# Altium footprint library IC.PcbLib: 204 footprints (part 5 of 13)
Each footprint in its own frame and in the unit in brackets; x right, y up, seen from the top. Pads: shape width x height; smd on the part's side, far side on the other; paste and mask are expansions set on the pad; w line width, h text height; cw(c..) or ccw(c..) is an arc to the next point about the centre after c.
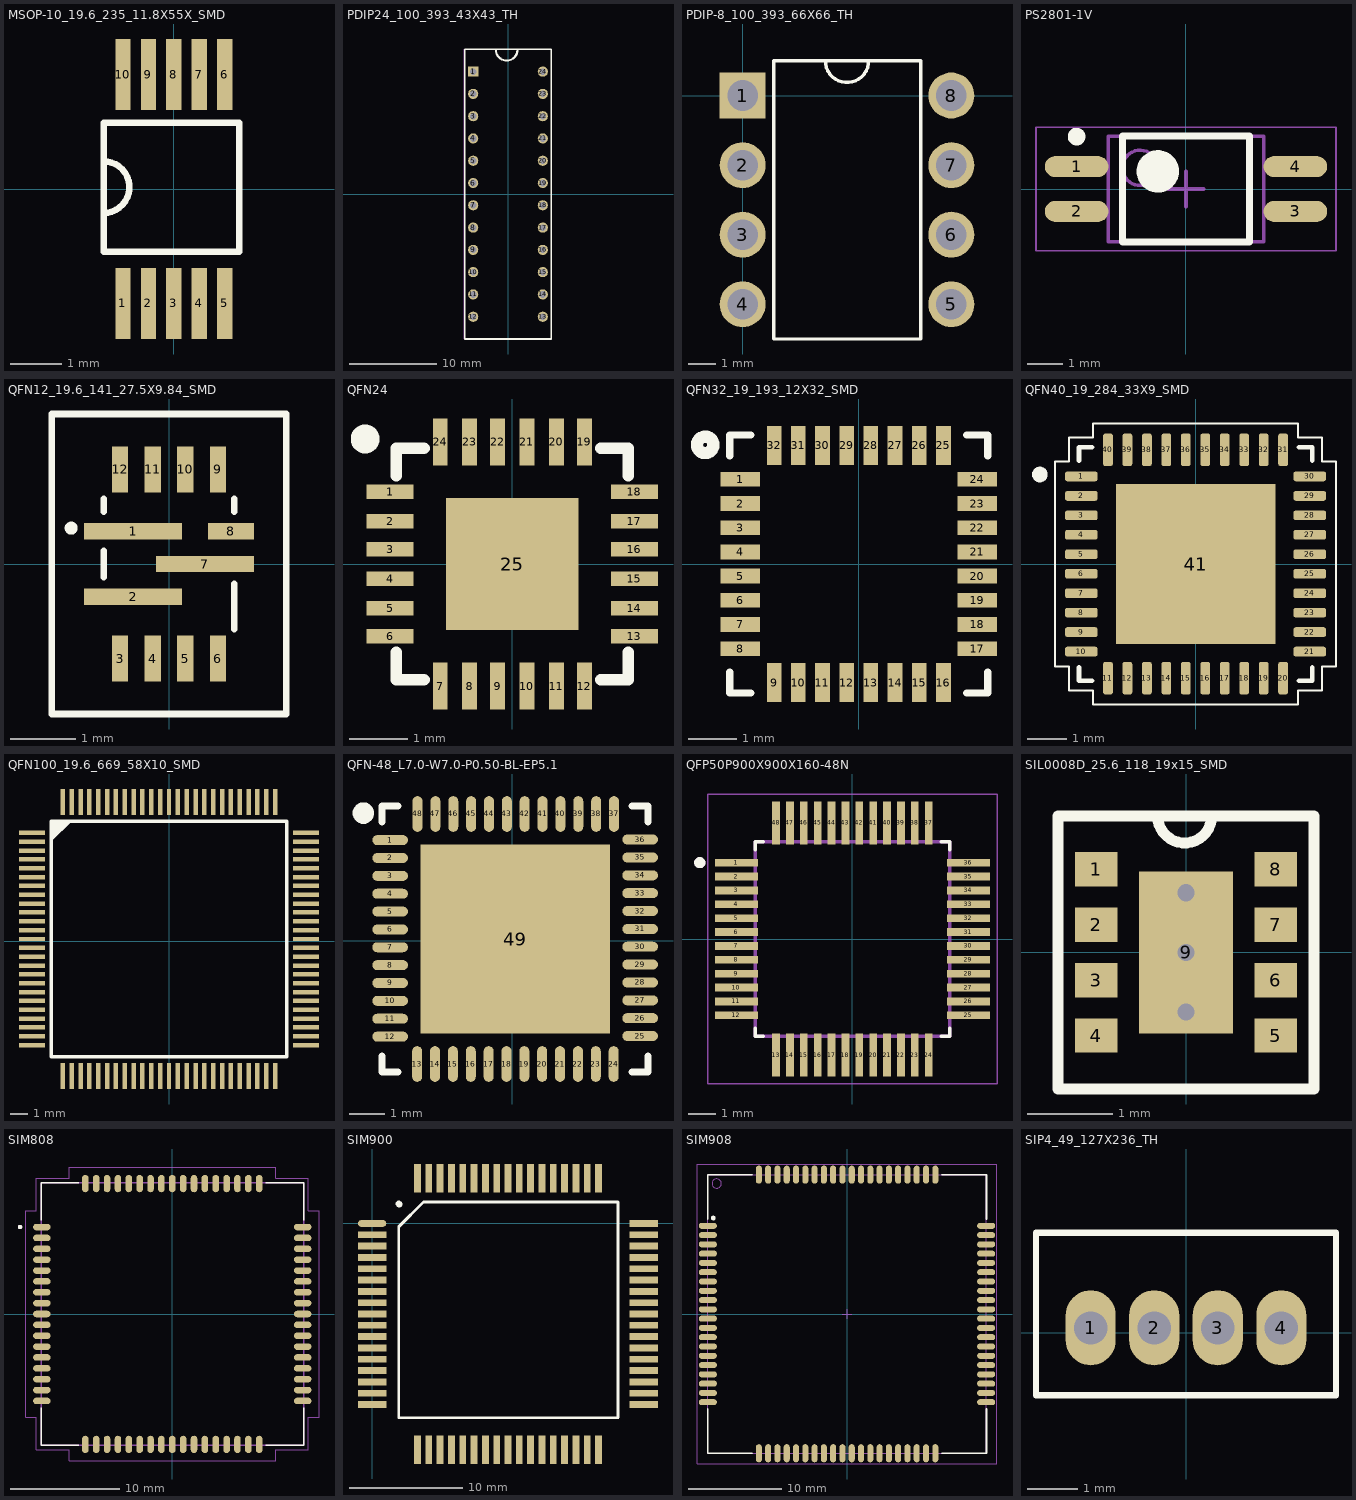
[diagram p4: the footprints below, top view; thin cyan lines are the x and y axes]

## MSOP-10_19.6_235_11.8X55X_SMD [mm] "IC"
height 0.95
pads (10):
  rect 0.3x1.4 smd mask+0.076: 1(-1,-2.25) 2(-0.5,-2.25) 3(0,-2.25) 4(0.5,-2.25) 5(1,-2.25) 6(1,2.25) 7(0.5,2.25) 8(0,2.25) 9(-0.5,2.25) 10(-1,2.25)
Top Overlay:
  lines w0.127: -1.381,-0.472 ccw(c-1.381,0.036) -1.381,0.544 ; -1.381,-1.234 -1.381,1.306 1.286,1.306 1.286,-1.234 -1.381,-1.234
3D body "User Library-MSOP-10-2.step": height 1.25, standoff 0, extent -1.5,-2.45 1.5,2.45

## PDIP24_100_393_43X43_TH [mm] "PDIP24"
height 4.95
pads (24):
  rect 1.16x1.16 / inner round 1.16 / far side rect 1.16x1.16 hole 0.76: 1(-3.97,13.97)
  round 1.16 hole 0.76: 2(-3.97,11.43) 3(-3.97,8.89) 4(-3.97,6.35) 5(-3.97,3.81) 6(-3.97,1.27) 7(-3.97,-1.27) 8(-3.97,-3.81) 9(-3.97,-6.35) 10(-3.97,-8.89) 11(-3.97,-11.43) 12(-3.97,-13.97) 13(3.97,-13.97) 14(3.97,-11.43) 15(3.97,-8.89) 16(3.97,-6.35) 17(3.97,-3.81) 18(3.97,-1.27) 19(3.97,1.27) 20(3.97,3.81) 21(3.97,6.35) 22(3.97,8.89) 23(3.97,11.43) 24(3.97,13.97)
Top Overlay:
  lines w0.178: -4.953,-16.51 -4.953,16.51 4.953,16.51 4.953,16.383 4.953,-16.51 -4.953,-16.51
  lines w0.254: -1.381,16.424 ccw(c-0.152,16.459) 1.076,16.438
Mechanical 20:
  lines w0.05: -4.96,-16.505 -4.96,16.505 4.96,16.505 4.96,-16.505 -4.96,-16.505
3D body "AD7730BNZ.stp": height 5.33, standoff -3.5, extent -4.11,-15.937 4.11,15.938

## PDIP-8_100_393_66X66_TH [mil] "DIP-8 Package"
height 200
pads (8):
  rect 66x66 hole 44: 1(0,0)
  round 66 hole 44: 2(0,-100) 3(0,-200) 4(0,-300) 5(300,-300) 6(300,-200) 7(300,-100) 8(300,0)
Top Overlay:
  lines w5: 118.78,50 ccw(c150,50) 181.22,50 ; 45,-350 255.91,-350 255.91,50 162,50 138,50 45,50 45,-350
3D body "CircuitWorks-DIP8.step": height 165, standoff -105, extent -12,-366 298,84

## PS2801-1V [mm] "SOIC127P600-8N"
height 2
pads (4):
  oval 1.8x0.6 smd: 1(-3.1,0.635) 2(-3.1,-0.635) 3(3.1,-0.635) 4(3.1,0.635)
Top Overlay:
  circle w0.25: c-3.1,1.485 r0.125
  circle w0.6: c-0.8,0.5 r0.3
  lines w0.2: -1.8,-1.5 -1.8,1.5 1.8,1.5 1.8,-1.5 -1.8,-1.5
Mechanical 13:
  circle w0.1: c-1.3,0.6 r0.5
  lines w0.1: -2.2,-1.5 -2.2,1.5 2.2,1.5 2.2,-1.5 -2.2,-1.5
Mechanical 15:
  lines w0.05: -4.25,-1.75 -4.25,1.75 4.25,1.75 4.25,-1.75 -4.25,-1.75
  lines w0.1: -0.5,0 0.5,0 ; 0,-0.5 0,0.5
3D body "PS2801-1V.step": height 2, standoff 0, extent -3.5,-1.5 3.5,1.5

## QFN12_19.6_141_27.5X9.84_SMD [mm] "QFN Package"
height 1
pads (12):
  rect 1.5x0.25 smd: 1(-0.55,0.5) 2(-0.55,-0.5) 7(0.55,0)
  rect 0.25x0.7 smd: 3(-0.75,-1.45) 4(-0.25,-1.45) 5(0.25,-1.45) 6(0.75,-1.45) 9(0.75,1.45) 10(0.25,1.45) 11(-0.25,1.45) 12(-0.75,1.45)
  rect 0.7x0.25 smd: 8(0.95,0.5)
Top Overlay:
  lines w0.1: -1,-0.2 -1,0.2 ; -1,0.8 -1,1 ; 1,-1 1,-0.3 ; 1,0.8 1,1 ; -1.8,-2.3 1.8,-2.3 ; -1.8,-2.3 -1.8,2.3 ; -1.8,-2.3 -1.8,2.3 ; -1.8,-2.3 1.8,-2.3 ; -1.8,2.3 1.8,2.3 ; -1.8,2.3 1.8,2.3 ; 1.8,-2.3 1.8,2.3 ; 1.8,-2.3 1.8,2.3 ; -1.5,0.5 cw(c-1.5,0.55) -1.5,0.6 cw(c-1.5,0.55) -1.5,0.5
3D body "User Library-qfn12p300x300ll055ls050h075.step": height 0.75, standoff 0, extent -1.5,-1.5 1.5,1.5

## QFN24 [mil]
pads (25):
  rect 32x10 smd: 1(-83,49) 2(-83,29) 3(-83,10) 4(-83,-10) 5(-83,-30) 6(-83,-49) 13(83,-49) 14(83,-30) 15(83,-10) 16(83,10) 17(83,29) 18(83,49)
  rect 10x32 smd: 7(-49,-83) 8(-29,-83) 9(-10,-83) 10(10,-83) 11(30,-83) 12(49,-83) 19(49,83) 20(30,83) 21(10,83) 22(-10,83) 23(-29,83) 24(-49,83)
  rect 90x90 smd: 25(0,0)
Top Overlay:
  lines w7.9: -78.7,-60 -78.7,-78.7 -60,-78.7 ; -78.7,60 -78.7,78.7 -60,78.7 ; 60,-78.7 78.7,-78.7 78.7,-60 ; 60,78.7 78.7,78.7 78.7,60
  lines w9.8: -95,84.9 cw(c-99.9,84.95) -95,85
3D body "QFN-24 (4x4x0.9).step": height 36.22, standoff 0, extent -78.28,-79.2 79.2,78.28

## QFN32_19_193_12X32_SMD [mil] "QFN Package"
pads (32):
  rect 32x12 smd: 1(-96.55,68.9) 2(-96.55,49.21) 3(-96.55,29.53) 4(-96.55,9.84) 5(-96.55,-9.84) 6(-96.55,-29.53) 7(-96.55,-49.21) 8(-96.55,-68.9) 17(96.55,-68.9) 18(96.55,-49.21) 19(96.55,-29.53) 20(96.55,-9.84) 21(96.55,9.84) 22(96.55,29.53) 23(96.55,49.21) 24(96.55,68.9)
  rect 12x32 smd: 9(-68.9,-96.55) 10(-49.21,-96.55) 11(-29.53,-96.55) 12(-9.84,-96.55) 13(9.84,-96.55) 14(29.53,-96.55) 15(49.21,-96.55) 16(68.9,-96.55) 25(68.9,96.55) 26(49.21,96.55) 27(29.53,96.55) 28(9.84,96.55) 29(-9.84,96.55) 30(-29.53,96.55) 31(-49.21,96.55) 32(-68.9,96.55)
Top Overlay:
  circle w10: c-125,97 r6.71
  lines w6: -105,-88 -105,-105 -88,-105 ; -105,88 -105,105 -88,105 ; 88,-105 105,-105 105,-88 ; 88,105 105,105 105,88
3D body "User Library-QFN32-1.step": height 36.92, standoff 0.31, extent -98.43,-98.44 98.43,98.44

## QFN40_19_284_33X9_SMD [mm]
pads (41):
  rrect48% 0.84x0.25 smd: 1(-2.935,2.25) 2(-2.935,1.75) 3(-2.935,1.25) 4(-2.935,0.75) 5(-2.935,0.25) 6(-2.935,-0.25) 7(-2.935,-0.75) 8(-2.935,-1.25) 9(-2.935,-1.75) 10(-2.935,-2.25) 21(2.935,-2.25) 22(2.935,-1.75) 23(2.935,-1.25) 24(2.935,-0.75) 25(2.935,-0.25) 26(2.935,0.25) 27(2.935,0.75) 28(2.935,1.25) 29(2.935,1.75) 30(2.935,2.25)
  rrect48% 0.25x0.84 smd: 11(-2.25,-2.935) 12(-1.75,-2.935) 13(-1.25,-2.935) 14(-0.75,-2.935) 15(-0.25,-2.935) 16(0.25,-2.935) 17(0.75,-2.935) 18(1.25,-2.935) 19(1.75,-2.935) 20(2.25,-2.935) 31(2.25,2.935) 32(1.75,2.935) 33(1.25,2.935) 34(0.75,2.935) 35(0.25,2.935) 36(-0.25,2.935) 37(-0.75,2.935) 38(-1.25,2.935) 39(-1.75,2.935) 40(-2.25,2.935)
  rect 4.1x4.1 smd paste-3: 41(0,0)
Top Overlay:
  circle w0.2: c-4,2.3 r0.1
  lines w0.05: -3.61,-2.63 -3.61,2.63 -3.25,2.63 -3.25,3.25 -2.63,3.25 -2.63,3.61 2.63,3.61 2.63,3.25 3.25,3.25 3.25,2.63 3.61,2.63 3.61,-2.63 3.25,-2.63 3.25,-3.25 2.63,-3.25 2.63,-3.61 -2.63,-3.61 -2.63,-3.25 -3.25,-3.25 -3.25,-2.63 -3.61,-2.63
  lines w0.127: -3,-2.66 -3,-3 -2.66,-3 ; -3,2.66 -3,3 -2.66,3 ; 2.66,-3 3,-3 3,-2.66 ; 2.66,3 3,3 3,2.66
Top Paste:
  region: 1.3,-1.303 -1.303,-1.303 -1.303,1.3 1.3,1.3
3D body "ALSRobot-QFN40 6X6.STEP": height 1.06, standoff 0.01, extent -3.075,-3 3.075,3.15

## QFN100_19.6_669_58X10_SMD [mm] "CASE: QFN"
height 1.6
pads (100):
  rect 1.475x0.254 smd mask+0.076: 1(-7.738,6.127) 2(-7.738,5.627) 3(-7.738,5.127) 4(-7.738,4.627) 5(-7.738,4.127) 6(-7.738,3.627) 7(-7.738,3.127) 8(-7.738,2.627) 9(-7.738,2.127) 10(-7.738,1.627) 11(-7.738,1.127) 12(-7.738,0.627) 13(-7.738,0.127) 14(-7.738,-0.373) 15(-7.738,-0.873) 16(-7.738,-1.373) 17(-7.738,-1.873) 18(-7.738,-2.373) 19(-7.738,-2.873) 20(-7.738,-3.373) 21(-7.738,-3.873) 22(-7.738,-4.373) 23(-7.738,-4.873) 24(-7.738,-5.373) 25(-7.738,-5.873) 51(7.738,-5.873) 52(7.738,-5.373) 53(7.738,-4.873) 54(7.738,-4.373) 55(7.738,-3.873) 56(7.738,-3.373) 57(7.738,-2.873) 58(7.738,-2.373) 59(7.738,-1.873) 60(7.738,-1.373) 61(7.738,-0.873) 62(7.738,-0.373) 63(7.738,0.127) 64(7.738,0.627) 65(7.738,1.127) 66(7.738,1.627) 67(7.738,2.127) 68(7.738,2.627) 69(7.738,3.127) 70(7.738,3.627) 71(7.738,4.127) 72(7.738,4.627) 73(7.738,5.127) 74(7.738,5.627) 75(7.738,6.127)
  rect 0.254x1.475 smd mask+0.076: 26(-6,-7.611) 27(-5.5,-7.611) 28(-5,-7.611) 29(-4.5,-7.611) 30(-4,-7.611) 31(-3.5,-7.611) 32(-3,-7.611) 33(-2.5,-7.611) 34(-2,-7.611) 35(-1.5,-7.611) 36(-1,-7.611) 37(-0.5,-7.611) 38(0,-7.611) 39(0.5,-7.611) 40(1,-7.611) 41(1.5,-7.611) 42(2,-7.611) 43(2.5,-7.611) 44(3,-7.611) 45(3.5,-7.611) 46(4,-7.611) 47(4.5,-7.611) 48(5,-7.611) 49(5.5,-7.611) 50(6,-7.611) 76(6,7.865) 77(5.5,7.865) 78(5,7.865) 79(4.5,7.865) 80(4,7.865) 81(3.5,7.865) 82(3,7.865) 83(2.5,7.865) 84(2,7.865) 85(1.5,7.865) 86(1,7.865) 87(0.5,7.865) 88(0,7.865) 89(-0.5,7.865) 90(-1,7.865) 91(-1.5,7.865) 92(-2,7.865) 93(-2.5,7.865) 94(-3,7.865) 95(-3.5,7.865) 96(-4,7.865) 97(-4.5,7.865) 98(-5,7.865) 99(-5.5,7.865) 100(-6,7.865)
Top Overlay:
  region: -6.65,6.68 -6.548,6.782 -5.507,6.782 -6.65,5.639
  lines w0.2: -6.65,-6.523 6.65,-6.523 6.65,6.777 -6.65,6.777 -6.65,-6.523
3D body "STM32F407VGT6.stp": height 1.6, standoff 0, extent -8,-8 8,8
3D body "STM32F407VGT6.stp": height 1.6, standoff 0, extent -8,-7.873 8,8.127

## QFN-48_L7.0-W7.0-P0.50-BL-EP5.1 [mm]
pads (49):
  oval 1x0.28 smd: 1(-3.424,2.82) 2(-3.424,2.319) 3(-3.424,1.819) 4(-3.424,1.318) 5(-3.424,0.818) 6(-3.424,0.318) 7(-3.424,-0.18) 8(-3.424,-0.681) 9(-3.424,-1.181) 10(-3.424,-1.681) 11(-3.424,-2.182) 12(-3.424,-2.682) 25(3.576,-2.667) 26(3.576,-2.166) 27(3.576,-1.666) 28(3.576,-1.166) 29(3.576,-0.665) 30(3.576,-0.165) 31(3.576,0.333) 32(3.576,0.833) 33(3.576,1.334) 34(3.576,1.834) 35(3.576,2.334) 36(3.576,2.835)
  oval 0.28x1 smd: 13(-2.667,-3.449) 14(-2.166,-3.449) 15(-1.666,-3.449) 16(-1.166,-3.449) 17(-0.665,-3.449) 18(-0.165,-3.449) 19(0.333,-3.449) 20(0.833,-3.449) 21(1.334,-3.449) 22(1.834,-3.449) 23(2.334,-3.449) 24(2.835,-3.449) 37(2.845,3.551) 38(2.345,3.551) 39(1.844,3.551) 40(1.344,3.551) 41(0.843,3.551) 42(0.343,3.551) 43(-0.155,3.551) 44(-0.655,3.551) 45(-1.156,3.551) 46(-1.656,3.551) 47(-2.156,3.551) 48(-2.657,3.551)
  rect 5.3x5.3 smd: 49(0.076,0.051)
Top Overlay:
  lines w0.2: -3.649,-3.224 -3.649,-3.674 -3.199,-3.674 ; -3.649,3.326 -3.649,3.776 -3.199,3.776 ; 3.351,-3.674 3.801,-3.674 3.801,-3.224 ; 3.351,3.776 3.801,3.776 3.801,3.326
  lines w0.3: -4.023,3.574 cw(c-4.173,3.575) -4.023,3.576
3D body "QFN127P600-8N.step": height 0.75, standoff 0, extent -3.499,-3.524 3.651,3.626

## QFP50P900X900X160-48N [mm]
height 1.6
pads (48):
  rect 1.56x0.28 smd: 1(-4.18,2.75) 2(-4.18,2.25) 3(-4.18,1.75) 4(-4.18,1.25) 5(-4.18,0.75) 6(-4.18,0.25) 7(-4.18,-0.25) 8(-4.18,-0.75) 9(-4.18,-1.25) 10(-4.18,-1.75) 11(-4.18,-2.25) 12(-4.18,-2.75) 25(4.18,-2.75) 26(4.18,-2.25) 27(4.18,-1.75) 28(4.18,-1.25) 29(4.18,-0.75) 30(4.18,-0.25) 31(4.18,0.25) 32(4.18,0.75) 33(4.18,1.25) 34(4.18,1.75) 35(4.18,2.25) 36(4.18,2.75)
  rect 0.28x1.56 smd: 13(-2.75,-4.18) 14(-2.25,-4.18) 15(-1.75,-4.18) 16(-1.25,-4.18) 17(-0.75,-4.18) 18(-0.25,-4.18) 19(0.25,-4.18) 20(0.75,-4.18) 21(1.25,-4.18) 22(1.75,-4.18) 23(2.25,-4.18) 24(2.75,-4.18) 37(2.75,4.18) 38(2.25,4.18) 39(1.75,4.18) 40(1.25,4.18) 41(0.75,4.18) 42(0.25,4.18) 43(-0.25,4.18) 44(-0.75,4.18) 45(-1.25,4.18) 46(-1.75,4.18) 47(-2.25,4.18) 48(-2.75,4.18)
Top Overlay:
  circle w0.2: c-5.5,2.75 r0.1
  lines w0.127: -3.5,-3.21 -3.5,-3.5 -3.21,-3.5 ; -3.5,3.21 -3.5,3.5 -3.21,3.5 ; 3.21,-3.5 3.5,-3.5 3.5,-3.21 ; 3.21,3.5 3.5,3.5 3.5,3.21
Mechanical 13:
  circle w0.2: c-5.5,2.75 r0.1
  lines w0.127: -3.5,-3.5 -3.5,3.5 3.5,3.5 3.5,-3.5 -3.5,-3.5
Mechanical 15:
  lines w0.05: -5.21,-5.21 -5.21,5.21 5.21,5.21 5.21,-5.21 -5.21,-5.21
3D body "step_temp.STEP": height 1.58, standoff -0.02, extent -4.5,-4.5 4.5,4.5

## SIL0008D_25.6_118_19x15_SMD [mm] "8-LDFN Exposed Pad, Module"
height 1.53
pads (9):
  rect 0.5x0.4 smd mask+0.076: 1(-1.05,0.975) 2(-1.05,0.325) 3(-1.05,-0.325) 4(-1.05,-0.975) 5(1.05,-0.975) 6(1.05,-0.325) 7(1.05,0.325) 8(1.05,0.975)
  rect 1.1x1.9 smd mask+0.076: 9(0,0)
via 0,-0.7 diameter 0.4 hole 0.2
via 0,0 diameter 0.4 hole 0.2
via 0,0.7 diameter 0.4 hole 0.2
Top Overlay:
  lines w0.127: -0.332,1.6 ccw(c-0.016,1.6) 0.3,1.6 ; -1.5,-1.6 1.5,-1.6 1.5,1.6 -1.5,1.6 -1.5,-1.6
3D body "User Library-SIL0008D.STEP": height 1.63, standoff 0.1, extent -1.4,-1.5 1.4,1.5

## SIM808 [mm]
pads (68):
  oval 1.6x0.6 smd: 1(-12,8) 2(-12,7) 3(-12,6) 4(-12,5) 5(-12,4) 6(-12,3) 7(-12,2) 8(-12,1) 9(-12,0) 10(-12,-1) 11(-12,-2) 12(-12,-3) 13(-12,-4) 14(-12,-5) 15(-12,-6) 16(-12,-7) 17(-12,-8) 35(12,-8) 36(12,-7) 37(12,-6) 38(12,-5) 39(12,-4) 40(12,-3) 41(12,-2) 42(12,-1) 43(12,0) 44(12,1) 45(12,2) 46(12,3) 47(12,4) 48(12,5) 49(12,6) 50(12,7) 51(12,8)
  oval 0.6x1.6 smd: 18(-8,-12) 19(-7,-12) 20(-6,-12) 21(-5,-12) 22(-4,-12) 23(-3,-12) 24(-2,-12) 25(-1,-12) 26(0,-12) 27(1,-12) 28(2,-12) 29(3,-12) 30(4,-12) 31(5,-12) 32(6,-12) 33(7,-12) 34(8,-12) 52(8,12) 53(7,12) 54(6,12) 55(5,12) 56(4,12) 57(3,12) 58(2,12) 59(1,12) 60(0,12) 61(-1,12) 62(-2,12) 63(-3,12) 64(-4,12) 65(-5,12) 66(-6,12) 67(-7,12) 68(-8,12)
Top Overlay:
  circle w0.2: c-14,8 r0.1
  lines w0.127: -12.075,-8.62 -12.075,-12.075 -8.62,-12.075 ; -12.075,8.62 -12.075,12.075 -8.62,12.075 ; 8.62,-12.075 12.075,-12.075 12.075,-8.62 ; 8.62,12.075 12.075,12.075 12.075,8.62
Mechanical 13:
  circle w0.2: c-14,8 r0.1
  lines w0.127: -12.075,-12.075 -12.075,12.075 12.075,12.075 12.075,-12.075 -12.075,-12.075
Mechanical 15:
  lines w0.05: -13.5,-9.5 -13.5,9.5 -12.5,9.5 -12.5,12.5 -9.5,12.5 -9.5,13.5 9.5,13.5 9.5,12.5 12.5,12.5 12.5,9.5 13.5,9.5 13.5,-9.5 12.5,-9.5 12.5,-12.5 9.5,-12.5 9.5,-13.5 -9.5,-13.5 -9.5,-12.5 -12.5,-12.5 -12.5,-9.5 -13.5,-9.5
3D body "SIM808--3DModel-STEP-56544.STEP": height 2.8, standoff 0, extent -12,-11.935 12,12.065

## SIM900 [mm]
pads (68):
  oval 2.5x0.6 smd: 1(0,0)
  rect 2.5x0.6 smd: 2(0,-1) 3(0,-2) 4(0,-3) 5(0,-4) 6(0,-5) 7(0,-6) 8(0,-7) 9(0,-8) 10(0,-9) 11(0,-10) 12(0,-11) 13(0,-12) 14(0,-13) 15(0,-14) 16(0,-15) 17(0,-16) 35(24,-16) 36(24,-15) 37(24,-14) 38(24,-13) 39(24,-12) 40(24,-11) 41(24,-10) 42(24,-9) 43(24,-8) 44(24,-7) 45(24,-6) 46(24,-5) 47(24,-4) 48(24,-3) 49(24,-2) 50(24,-1) 51(24,0)
  rect 0.6x2.5 smd: 18(4,-20) 19(5,-20) 20(6,-20) 21(7,-20) 22(8,-20) 23(9,-20) 24(10,-20) 25(11,-20) 26(12,-20) 27(13,-20) 28(14,-20) 29(15,-20) 30(16,-20) 31(17,-20) 32(18,-20) 33(19,-20) 34(20,-20) 52(20,4) 53(19,4) 54(18,4) 55(17,4) 56(16,4) 57(15,4) 58(14,4) 59(13,4) 60(12,4) 61(11,4) 62(10,4) 63(9,4) 64(8,4) 65(7,4) 66(6,4) 67(5,4) 68(4,4)
Top Overlay:
  lines w0.25: 2.586,-17.16 21.697,-17.16 21.717,-17.14 21.717,1.547 ; 2.675,-17.163 2.357,-17.163 2.347,-17.153 2.347,-0.297 4.526,1.882 21.707,1.882 21.714,1.875 21.714,1.478
  lines w0.55: 2.349,1.73 2.4,1.679 2.413,1.679 2.416,1.679 2.423,1.687
3D body "SIM900.step": height 3.04, standoff 0.02, extent 0,-20 24,4

## SIM908 [mm]
height 3
pads (80):
  oval 1.95x0.65 smd: 1(-15,9.5) 2(-15,8.5) 3(-15,7.5) 4(-15,6.5) 5(-15,5.5) 6(-15,4.5) 7(-15,3.5) 8(-15,2.5) 9(-15,1.5) 10(-15,0.5) 11(-15,-0.5) 12(-15,-1.5) 13(-15,-2.5) 14(-15,-3.5) 15(-15,-4.5) 16(-15,-5.5) 17(-15,-6.5) 18(-15,-7.5) 19(-15,-8.5) 20(-15,-9.5) 41(14.98,-9.5) 42(14.98,-8.5) 43(14.98,-7.5) 44(14.98,-6.5) 45(14.98,-5.5) 46(14.98,-4.5) 47(14.98,-3.5) 48(14.98,-2.5) 49(14.98,-1.5) 50(14.98,-0.5) 51(14.98,0.5) 52(14.98,1.5) 53(14.98,2.5) 54(14.98,3.5) 55(14.98,4.5) 56(14.98,5.5) 57(14.98,6.5) 58(14.98,7.5) 59(14.98,8.5) 60(14.98,9.5)
  oval 0.65x1.95 smd: 21(-9.5,-15) 22(-8.5,-15) 23(-7.5,-15) 24(-6.5,-15) 25(-5.5,-15) 26(-4.5,-15) 27(-3.5,-15) 28(-2.5,-15) 29(-1.5,-15) 30(-0.5,-15) 31(0.5,-15) 32(1.5,-15) 33(2.5,-15) 34(3.5,-15) 35(4.5,-15) 36(5.5,-15) 37(6.5,-15) 38(7.5,-15) 39(8.5,-15) 40(9.5,-15) 61(9.5,15.005) 62(8.5,15.005) 63(7.5,15.005) 64(6.5,15.005) 65(5.5,15.005) 66(4.5,15.005) 67(3.5,15.005) 68(2.5,15.005) 69(1.5,15.005) 70(0.5,15.005) 71(-0.5,15.005) 72(-1.5,15.005) 73(-2.5,15.005) 74(-3.5,15.005) 75(-4.5,15.005) 76(-5.5,15.005) 77(-6.5,15.005) 78(-7.5,15.005) 79(-8.5,15.005) 80(-9.5,15.005)
Top Overlay:
  circle w0.25: c-14.405,10.335 r0.125
  lines w0.2: -15,-10.225 -15,-15 -10.225,-15 ; -15,10.225 -15,15 -10.225,15 ; 10.225,-15 15,-15 15,-10.225 ; 10.225,15 15,15 15,10.225
Mechanical 13:
  circle w0.1: c-14.05,14.05 r0.5
  lines w0.1: -15,-15 -15,15 15,15 15,-15 -15,-15
Mechanical 15:
  lines w0.1: -0.5,0 0.5,0 ; 0,-0.5 0,0.5 ; -16.145,-16.155 -16.145,16.155 16.125,16.155 16.125,-16.155 -16.145,-16.155
3D body "User Library-SIM908.STEP": height 3.22, standoff 0.02, extent -14.995,-15 15.005,15

## SIP4_49_127X236_TH [mm]
pads (4):
  oval 1x1.5 hole 0.66 mask+0.076: 1(-1.905,0.1) 2(-0.635,0.1) 3(0.635,0.1) 4(1.905,0.1)
Top Overlay:
  lines w0.127: -2.75,2 -3,2 ; -3,2 -3,-1.25 3,-1.25 3,2 -3,2
3D body "HIH8120-021-001S.stp": height 1.76, standoff -4.24, extent -2.45,-0.605 2.45,1.3